# EAGLE library part UC3843 (library madhu)
TI Current-Mode PWM Controller
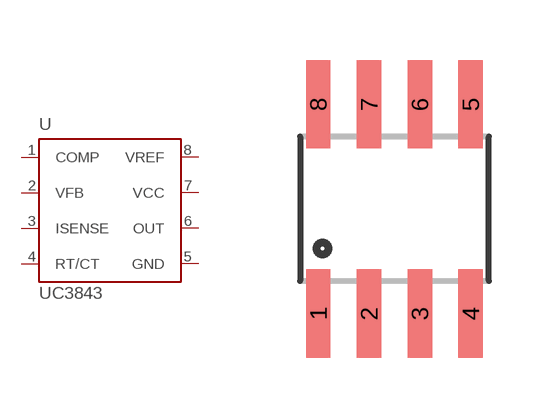
[diagram p42: symbol with the pads of SOIC-8; footprint SOIC-8]

Designator prefix U

## UC3843D  [SOIC-8]
1  COMP  in
2  VFB  in
3  ISENSE  in
4  RT/CT  in
5  GND  pwr
6  OUT  out
7  VCC  oc
8  VREF  pwr

## Footprint SOIC-8 (pad centres in mm)
Small Outline Package Fits JEDEC packages (narrow SOIC-8)
smd 0.61 x 2.21: 1 -1.905,-2.616; 2 -0.635,-2.616; 3 0.635,-2.616; 4 1.905,-2.616; 5 1.905,2.616; 6 0.635,2.616; 7 -0.635,2.616; 8 -1.905,2.616